# Altium footprint library Altium_Lib_Haris.PcbLib: 85 footprints (part 6 of 6)
Each footprint in its own frame and in the unit in brackets; x right, y up, seen from the top. Pads: shape width x height; smd on the part's side, far side on the other; paste and mask are expansions set on the pad; w line width, h text height; cw(c..) or ccw(c..) is an arc to the next point about the centre after c.
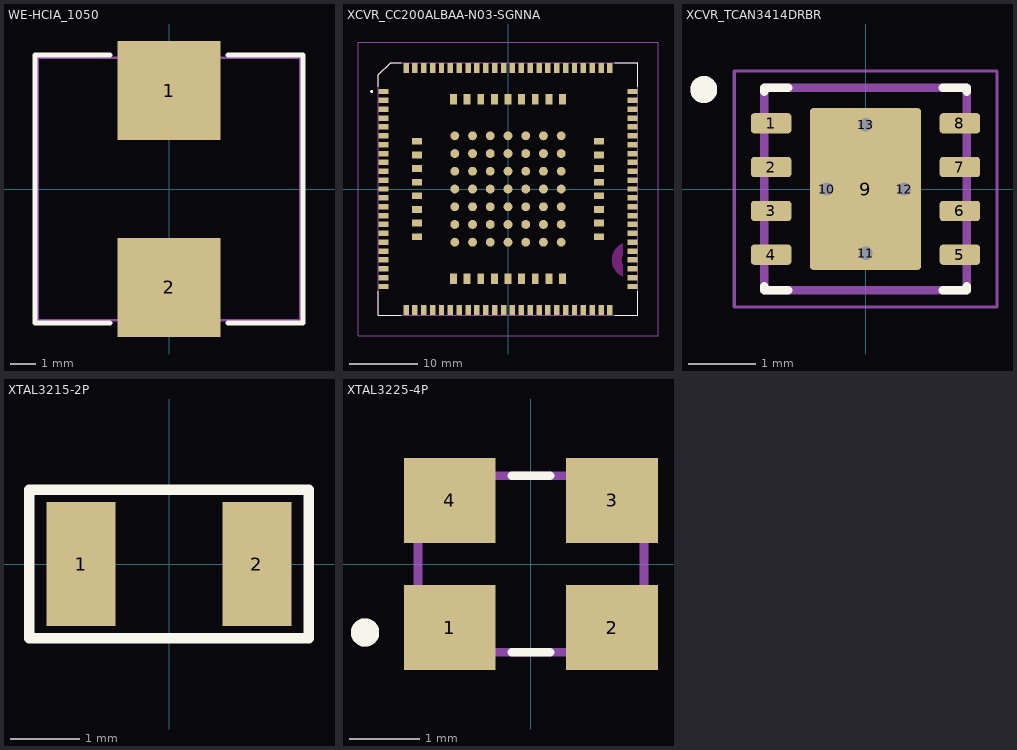
[diagram p5: the footprints below, top view; thin cyan lines are the x and y axes]

## WE-HCIA_1050 [mm]
pads (2):
  rect 4x3.85 smd paste+0 mask+0.102: 1(0,3.825) 2(0,-3.825)
Top Overlay:
  lines w0.2: -2.3,-5.2 -5.2,-5.2 -5.2,5.2 -2.3,5.2 ; 2.3,-5.2 5.2,-5.2 5.2,5.2 2.3,5.2
Mechanical 13:
  lines w0.1: -5.1,-5.1 -5.1,5.1 5.1,5.1 5.1,-5.1 -5.1,-5.1
3D body "STP_WE-HCIA-1050_7843250072+%28rev1%29.stp": height 4.73, standoff 0.01, extent -5.1,-5.25 5.1,5.25

## XCVR_CC200ALBAA-N03-SGNNA [mm]
height 3.55
pads (177):
  rect 1.5x0.8 smd: 1(-18.25,14.3) 2(-18.25,13) 3(-18.25,11.7) 4(-18.25,10.4) 5(-18.25,9.1) 6(-18.25,7.8) 7(-18.25,6.5) 8(-18.25,5.2) 9(-18.25,3.9) 10(-18.25,2.6) 11(-18.25,1.3) 12(-18.25,0) 13(-18.25,-1.3) 14(-18.25,-2.6) 15(-18.25,-3.9) 16(-18.25,-5.2) 17(-18.25,-6.5) 18(-18.25,-7.8) 19(-18.25,-9.1) 20(-18.25,-10.4) 21(-18.25,-11.7) 22(-18.25,-13) 23(-18.25,-14.3) 48(18.25,-14.3) 49(18.25,-13) 50(18.25,-11.7) 51(18.25,-10.4) 52(18.25,-9.1) 53(18.25,-7.8) 54(18.25,-6.5) 55(18.25,-5.2) 56(18.25,-3.9) 57(18.25,-2.6) 58(18.25,-1.3) 59(18.25,0) 60(18.25,1.3) 61(18.25,2.6) 62(18.25,3.9) 63(18.25,5.2) 64(18.25,6.5) 65(18.25,7.8) 66(18.25,9.1) 67(18.25,10.4) 68(18.25,11.7) 69(18.25,13) 70(18.25,14.3)
  rect 0.8x1.5 smd: 24(-14.95,-17.75) 25(-13.65,-17.75) 26(-12.35,-17.75) 27(-11.05,-17.75) 28(-9.75,-17.75) 29(-8.45,-17.75) 30(-7.15,-17.75) 31(-5.85,-17.75) 32(-4.55,-17.75) 33(-3.25,-17.75) 34(-1.95,-17.75) 35(-0.65,-17.75) 36(0.65,-17.75) 37(1.95,-17.75) 38(3.25,-17.75) 39(4.55,-17.75) 40(5.85,-17.75) 41(7.15,-17.75) 42(8.45,-17.75) 43(9.75,-17.75) 44(11.05,-17.75) 45(12.35,-17.75) 46(13.65,-17.75) 47(14.95,-17.75) 71(14.95,17.75) 72(13.65,17.75) 73(12.35,17.75) 74(11.05,17.75) 75(9.75,17.75) 76(8.45,17.75) 77(7.15,17.75) 78(5.85,17.75) 79(4.55,17.75) 80(3.25,17.75) 81(1.95,17.75) 82(0.65,17.75) 83(-0.65,17.75) 84(-1.95,17.75) 85(-3.25,17.75) 86(-4.55,17.75) 87(-5.85,17.75) 88(-7.15,17.75) 89(-8.45,17.75) 90(-9.75,17.75) 91(-11.05,17.75) 92(-12.35,17.75) 93(-13.65,17.75) 94(-14.95,17.75)
  rect 1.5x1 smd: 95(-13.35,7) 96(-13.35,5) 97(-13.35,3) 98(-13.35,1) 99(-13.35,-1) 100(-13.35,-3) 101(-13.35,-5) 102(-13.35,-7) 112(13.35,-7) 113(13.35,-5) 114(13.35,-3) 115(13.35,-1) 116(13.35,1) 117(13.35,3) 118(13.35,5) 119(13.35,7)
  rect 1x1.5 smd: 103(-8,-13.15) 104(-6,-13.15) 105(-4,-13.15) 106(-2,-13.15) 107(0,-13.15) 108(2,-13.15) 109(4,-13.15) 110(6,-13.15) 111(8,-13.15) 120(8,13.15) 121(6,13.15) 122(4,13.15) 123(2,13.15) 124(0,13.15) 125(-2,13.15) 126(-4,13.15) 127(-6,13.15) 128(-8,13.15)
  round 1.3 smd: 129(-7.8,7.8) 130(-7.8,5.2) 131(-7.8,2.6) 132(-7.8,0) 133(-7.8,-2.6) 134(-7.8,-5.2) 135(-7.8,-7.8) 136(-5.2,7.8) 137(-5.2,5.2) 138(-5.2,2.6) 139(-5.2,0) 140(-5.2,-2.6) 141(-5.2,-5.2) 142(-5.2,-7.8) 143(-2.6,7.8) 144(-2.6,5.2) 145(-2.6,2.6) 146(-2.6,0) 147(-2.6,-2.6) 148(-2.6,-5.2) 149(-2.6,-7.8) 150(0,7.8) 151(0,5.2) 152(0,2.6) 153(0,0) 154(0,-2.6) 155(0,-5.2) 156(0,-7.8) 157(2.6,7.8) 158(2.6,5.2) 159(2.6,2.6) 160(2.6,0) 161(2.6,-2.6) 162(2.6,-5.2) 163(2.6,-7.8) 164(5.2,7.8) 165(5.2,5.2) 166(5.2,2.6) 167(5.2,0) 168(5.2,-2.6) 169(5.2,-5.2) 170(5.2,-7.8) 171(7.8,7.8) 172(7.8,5.2) 173(7.8,2.6) 174(7.8,0) 175(7.8,-2.6) 176(7.8,-5.2) 177(7.8,-7.8)
Top Overlay:
  circle w0.2: c-20,14.3 r0.1
  lines w0.127: -19,-15.02 -19,-18.5 -15.67,-18.5 ; -19,15.02 -19,16.725 -17.225,18.5 -15.67,18.5 ; 15.67,-18.5 19,-18.5 19,-15.02 ; 15.67,18.5 19,18.5 19,15.02
Keep-Out Layer:
  region: 16.849,-9.701 16.825,-9.74 16.8,-9.783 16.777,-9.827 16.756,-9.872 16.737,-9.918 16.719,-9.964 16.703,-10.011 16.689,-10.058 16.677,-10.106 16.667,-10.154 16.658,-10.203 16.652,-10.252 16.647,-10.301 16.644,-10.351 16.643,-10.4 16.644,-10.449 16.647,-10.499 16.652,-10.548 16.658,-10.597 16.667,-10.646 16.677,-10.694 16.689,-10.742 16.703,-10.789 16.719,-10.836 16.737,-10.882 16.756,-10.928 16.777,-10.973 16.8,-11.017 16.825,-11.059 16.849,-11.099 16.849,-12.85 16.657,-12.756 16.48,-12.651 16.312,-12.533 16.153,-12.403 16.005,-12.26 15.868,-12.107 15.743,-11.944 15.631,-11.771 15.532,-11.591 15.448,-11.403 15.378,-11.21 15.324,-11.012 15.285,-10.81 15.261,-10.605 15.253,-10.4 15.261,-10.195 15.285,-9.99 15.324,-9.788 15.378,-9.59 15.448,-9.397 15.532,-9.209 15.631,-9.029 15.743,-8.856 15.868,-8.693 16.005,-8.54 16.153,-8.397 16.312,-8.267 16.48,-8.149 16.657,-8.044 16.849,-7.95
Mechanical 13:
  circle w0.2: c-20,14.3 r0.1
  lines w0.127: -19,-18.5 19,-18.5 19,18.5 -17.225,18.5 -19,16.725 -19,-18.5
Mechanical 15:
  lines w0.05: -22,-21.5 -22,21.5 22,21.5 22,-21.5 -22,-21.5

## XCVR_TCAN3414DRBR [mm]
height 1
pads (13):
  rrect33% 0.6x0.3 smd paste-1 mask+0: 1(-1.4,0.975) 2(-1.4,0.325) 3(-1.4,-0.325) 4(-1.4,-0.975) 5(1.4,-0.975) 6(1.4,-0.325) 7(1.4,0.325) 8(1.4,0.975)
  rrect6% 1.65x2.4 smd paste-2 mask+0: 9(0,0)
  round 0.3 hole 0.2 mask+0: 10(-0.575,0) 11(0,-0.95) 12(0.575,0) 13(0,0.95)
Top Overlay:
  circle w0.2: c-2.4,1.475 r0.1
  lines w0.127: -1.5,-1.445 -1.5,-1.5 -1.145,-1.5 ; -1.5,1.445 -1.5,1.5 -1.145,1.5 ; 1.145,-1.5 1.5,-1.5 1.5,-1.445 ; 1.145,1.5 1.5,1.5 1.5,1.445
Top Paste:
  drawing of 10 lines, arcs and shapes, not listed
Top Solder:
  drawing of 9 lines, arcs and shapes, not listed
Mechanical 13:
  circle w0.2: c-2.4,1.475 r0.1
  lines w0.127: -1.5,-1.5 -1.5,1.5 1.5,1.5 1.5,-1.5 -1.5,-1.5
Mechanical 15:
  lines w0.05: -1.95,-1.75 -1.95,1.75 1.95,1.75 1.95,-1.75 -1.95,-1.75
3D body "step_temp.STEP": height 1, standoff 0, extent -1.5,-1.5 1.5,1.5

## XTAL3215-2P [mm]
pads (2):
  rect 1x1.8 smd paste+0 mask+0.051: 1(-1.275,0) 2(1.275,0)
Top Overlay:
  lines w0.152: -2.029,-1.078 -2.029,1.079 2.029,1.079 2.029,-1.078 -2.029,-1.078
Mechanical 15:
  region: -1.45,0.65 -0.85,0.65 -0.85,-0.65 -1.45,-0.65
  region: 0.85,0.65 1.45,0.65 1.45,-0.65 0.85,-0.65
3D body "ABS07-32.768KHZ-T--3DModel-STEP-400430.STEP": height 0.9, standoff 0.01, extent -1.575,-0.749 1.625,0.75

## XTAL3225-4P [mm]
pads (4):
  rect 1.3x1.2 smd: 1(-1.15,-0.9) 2(1.15,-0.9) 3(1.15,0.9) 4(-1.15,0.9)
Top Overlay:
  circle w0.2: c-2.35,-0.97 r0.1
  lines w0.127: -0.27,-1.25 0.27,-1.25 ; -0.27,1.25 0.27,1.25
Mechanical 13:
  circle w0.2: c-2.35,-0.97 r0.1
  lines w0.127: -1.6,-1.25 -1.6,1.25 1.6,1.25 1.6,-1.25 -1.6,-1.25
3D body "ECS-80-18-33-JGN-TR.STEP": height 0.8, standoff 0, extent -1.625,-1.25 1.575,1.25